# Altium integrated library Indutores.IntLib: 5 symbols
Pins are listed as number, name and electrical type; pins without a type are passive.

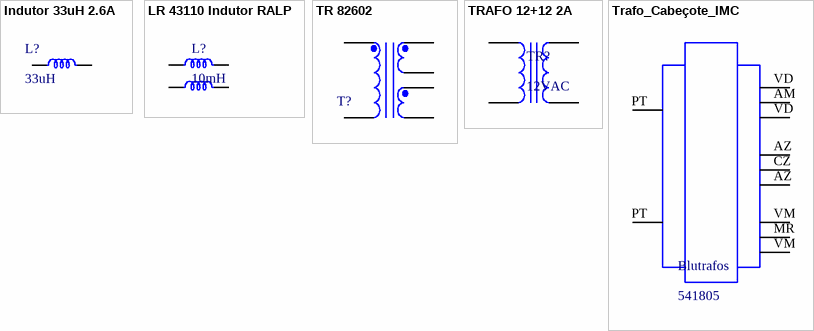
[diagram p0: symbols Indutor 33uH 2.6A to Trafo_Cabeçote_IMC]

## Indutor 33uH 2.6A
designator L?, comment 33uH
Indutor Encapsulado SMD - DR124-330 - 33uH; Datasheet: http://www.eletrodex.kinghost.net/Loja_Tray/Datasheets/Passivos/Indutores/DR124.pdf
footprint DR125 (12,5 x 12,5 x 6mm Linha DR125)
pins: 1, 2

## LR 43110 Indutor RALP
designator L?, comment 10mH
Indutor da RALP para filtro do sap modelo LR 43110
footprint Indutor SAP
pins: 1, 2, 3, 4

## TR 82602
designator T?
ISO TRANS 1:1
footprint TR 82602
pins: 1, 2, 3, 4, 5, 6

## TRAFO 12+12 2A
designator TR?, comment 12VAC
TRANSFORMADOR 220-12+12 2A
footprint TRAFO 12+12 2A
pins: 1, 2, 3, 4

## Trafo_Cabeçote_IMC
designator Blutrafos, comment 541805
Trafo da BLUTRAFOS para uso nos cabeçotes (vin =45V)
pins: AM, AZ, AZ, CZ, MR, PT, PT, VD, VD, VM, VM